# Altium schematic symbol library 110990030.SchLib: 1 symbol
Pins are listed as number, name and electrical type; pins without a type are passive.

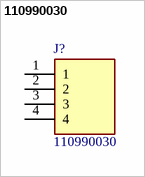
[diagram p0: symbol 110990030]

## 110990030
designator J?
GROVE 2MM 4PIN VERT CONN 10PCS; Manufacturer_Name: Seeed Studio; Geometry.Height: 8.6mm; Mouser Part Number: 713-110990030; Mouser Price/Stock: https://www.mouser.co.uk/ProductDetail/Seeed-Studio/110990030?qs=1%252B9yuXKSi8Dw9fpnq%252BdNzQ%3D%3D; Manufacturer_Part_Number: 110990030; Datasheet Link: https://statics3.seeedstudio.com/images/opl/datasheet/3470130P1.pdf
footprint 110990030
pins: 1, 2, 3, 4